# Altium schematic symbol library Mechanical.SchLib: 24 symbols
Pins are listed as number, name and electrical type; pins without a type are passive.

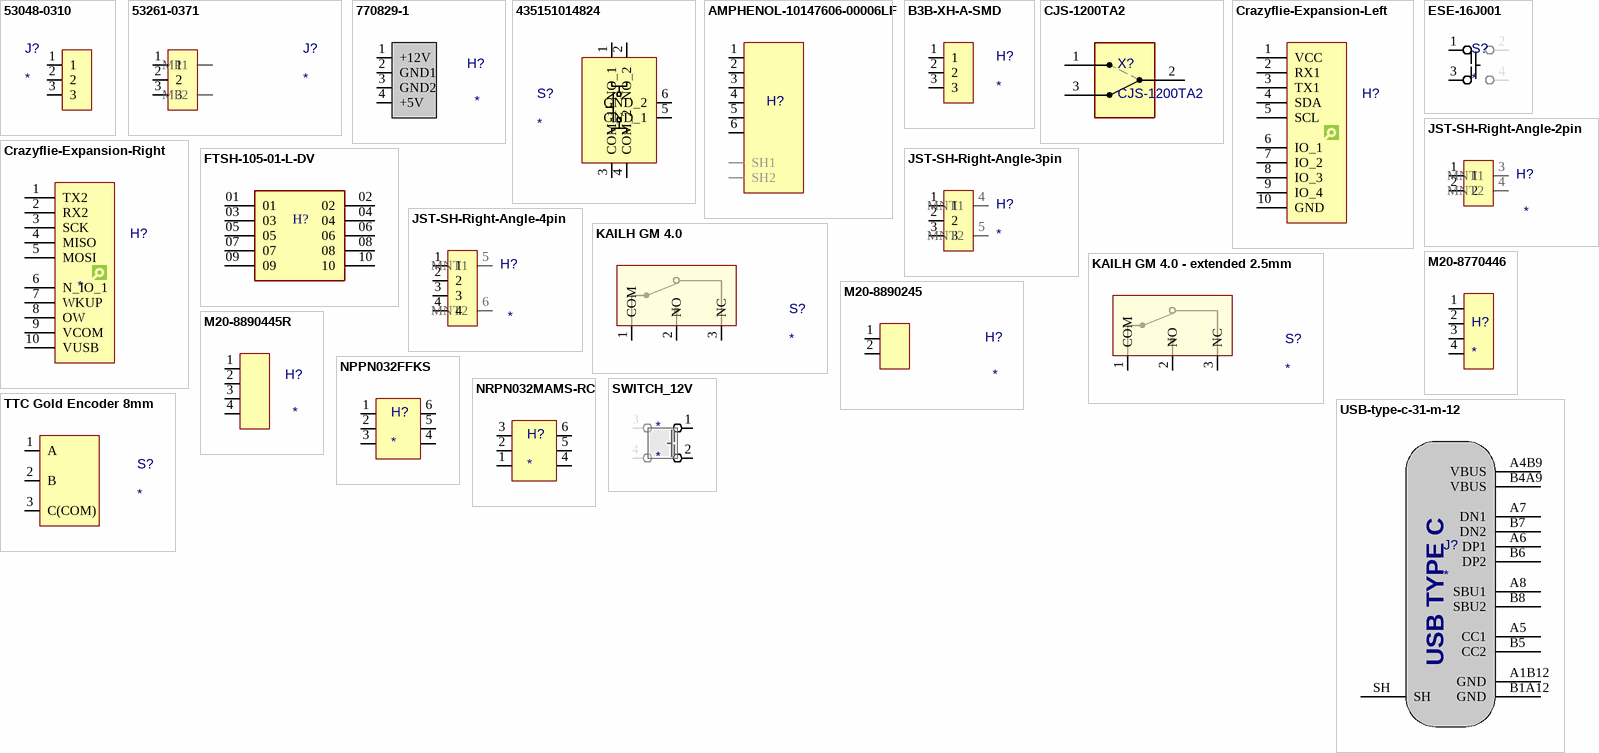
[diagram p0: symbols 53048-0310 to USB-type-c-31-m-12]

## 53048-0310
designator J?
Connector JST 1.25mm pitch THT; Manufacturer_Name: Molex; Manufacturer_Part_Number: 53048-0310; Description: Headers & Wire Housings RIGHT ANGLE HDR 3P; Datasheet Link: https://www.molex.com/pdm_docs/sd/530481010_sd.pdf; Height: 3.5mm; Mouser Part Number: 538-53048-0310; Mouser Price/Stock: https://www.mouser.co.uk/ProductDetail/Molex/53048-0310?qs=zXrbR4Jv0OfUlEeVnlaifA%3D%3D
footprint SHDRRA3W35P0X125_1X3_550X550X350P
pins: 1, 2, 3

## 53261-0371
designator J?
Headers & Wire Housings 1.25MM HDR 3 CKT Right-Angle; Manufacturer_Name: Molex; Manufacturer_Part_Number: 53261-0371; Datasheet Link: http://uk.rs-online.com/web/p/products/5427107P; Height: 3.6mm; Mouser Part Number: 538-53261-0371; Mouser Price/Stock: https://www.mouser.co.uk/ProductDetail/Molex/53261-0371?qs=%252B72YyncTwW%252BTQBxAO1kJjA%3D%3D
footprint 532610371 (Headers & Wire Housings 1.25MM HDR 3 CKT Right-Angle)
pins: 1, 2, 3, MP1, MP1 MP2

## 770829-1
designator H?
CONN HEADER SMD R/A 4POS 2.54MM; PACKAGING TAPE/REEL; 6MM MATING LENGTH; 1ROW; UNSHROUDED
footprint 770829-1 (Connector Header Surface Mount, Right Angle 4 position 0.200" (5.08mm))
pins: 1 +12V, 2 GND1, 3 GND2, 4 +5V

## 435151014824
designator S?
Switch normally open (NO); Manufacturer_Name: Wurth Elektronik; Manufacturer_Part_Number: 435151014824; Datasheet Link: https://componentsearchengine.com/Datasheets/2/435151014824.pdf; Height: 1.4mm; Mouser Part Number: 710-435151014824; Mouser Price/Stock: https://www.mouser.co.uk/ProductDetail/Wurth-Elektronik/435151014824?qs=OlC7AqGiEDkCCtReGm3ZVw%3D%3D
footprint 435151014824
pins: 1 NO_1, 2 NO_2, 3 COM_1, 4 COM_2, 5 GND_1, 6 GND_2

## AMPHENOL-10147606-00006LF
designator H?  (value not drawn)
Amphenol,1mm pitch, 6 Pos, 1 Row, SMD, Wire-to-Board, Right Angle, Male
footprint AMPHENOL-10147606-00006LF (Amphenol,1mm pitch, 6 Pos, 1 Row, SMD, Wire-to-Board, Right Angle, Male)
pins: 1, 2, 3, 4, 5, 6, SH1, SH2

## B3B-XH-A-SMD
designator H?
Repurposed as straight, side-looker SMD
footprint B3B-XH-A-SMD (Repursposed as straigh, side-looker SMD)
pins: 1, 2, 3

## CJS-1200TA2
designator X?
SPDT, ON-ON Slide, 100mA @ 6V DC J-Hook SMD Terminals, T&R 1,000 pc Packaging, Non-washable with tape - Tape and Reel; ComponentLink1Description: Datasheet; ComponentLink1URL: https://eu.mouser.com/datasheet/2/972/cjs-1827353.pdf; ComponentLink2Description: Product Detail; ComponentLink2URL: https://eu.mouser.com/ProductDetail/Nidec-Components/CJS-1200TA2?qs=XeJtXLiO41Rf26ws0igWdA%3D%3D
footprint CJS-1200TA2 (ON-ON Slide Switches smd jumper switch, J hook, w/o detent,non-washable,tape)
pins: 1 NO, 2 COM, 3 NC

## Crazyflie-Expansion-Left
designator H?  (value not drawn)
10pos, 20x2x3mm, pitch 2mm, female SMD header
footprint SMD-Header-110990442 (10pos, 20x2x3mm, pitch 2mm, female SMD header)
pins: 1 VCC, 2 RX1, 3 TX1, 4 SDA, 5 SCL, 6 IO_1, 7 IO_2, 8 IO_3, 9 IO_4, 10 GND

## Crazyflie-Expansion-Right
designator H?
10pos, 20x2x3mm, pitch 2mm, female SMD header
footprint SMD-Header-110990442 (10pos, 20x2x3mm, pitch 2mm, female SMD header)
pins: 1 TX2, 2 RX2, 3 SCK, 4 MISO, 5 MOSI, 6 N_IO_1, 7 WKUP, 8 OW, 9 VCOM, 10 VUSB

## ESE-16J001
designator S?
1VR Detector Switches, 2.2mmx3.35mm (Height:1.5mm), 250mN
footprint ESE-16J001 (1VR Detector Switches, 2.2mmx3.35mm (Height:1.5mm), 250mN. With increased pad height for hand-solderability)
pins: 1, 2, 3, 4

## FTSH-105-01-L-DV
designator H?  (value not drawn)
Samtec, 2x5 pin, 1.27mm pitch, used for SWD
footprint FTSH-105-01-L-DV (Samtec, 2x5 pin, 1.27mm pitch)
pins: 01, 02, 03, 04, 05, 06, 07, 08, 09, 10

## JST-SH-Right-Angle-2pin
designator H?
JST SH 2-pin SMD right angle, 3D model also contains cable connection / 3D model is just a rough approximation
footprint JST-SH-Right-Angle-2pin (JST SH 2-pin SMD right angle, 3D model also contains cable connection / 3D model is just a rough approximation)
pins: 1, 2, 3 MNT1, 4 MNT2

## JST-SH-Right-Angle-3pin
designator H?
JST SH 3-pin SMD right angle, 3D model also contains cable connection / 3D model is just a rough approximation
footprint JST-SH-Right-Angle-3pin (JST SH 3-pin SMD right angle, 3D model also contains cable connection / 3D model is just a rough approximation)
pins: 1, 2, 3, 4 MNT1, 5 MNT2

## JST-SH-Right-Angle-4pin
designator H?
JST SH 4-pin SMD right angle, 3D model also contains cable connection / 3D model is just a rough approximation
footprint JST-SH-Right-Angle-4pin (JST SH 4-pin SMD right angle, 3D model also contains cable connection / 3D model is just a rough approximation)
pins: 1, 2, 3, 4, 5 MNT1, 6 MNT2

## KAILH GM 4.0
designator S?
Gaming mouse micro switch 60M life for computer mice left right button
footprint KAILH GM 4.0 (Gaming mouse micro switch 60M life for computer mice left right button)
pins: 1 COM, 2 NO, 3 NC

## KAILH GM 4.0 - extended 2.5mm
designator S?
Gaming mouse micro switch 60M life for computer mice left right button
footprint KAILH GM 4.0 - extended 2.5mm (Gaming mouse micro switch 60M life for computer mice left right button. With vertical spacer to be used with (TBA/12mm) encoder heights.)
pins: 1 COM, 2 NO, 3 NC

## M20-8770446
designator H?
Header 4x2.54mm male - Harwin Headers & Wire Housings 04 SIL VERTICAL SMT HEADER TIN
footprint M20-8890445R (CONN HEADER SMD R/A 4POS 2.54MM)
pins: 1, 2, 3, 4

## M20-8890245
designator H?
CONN HEADER SMD R/A 2POS 2.54MM; PACKAGING TUBE; 6MM MATING LENGTH; 1ROW; UNSHROUDED
footprint M20-8890245 (CONN HEADER SMD R/A 2POS 2.54MM)
pins: 1, 2

## M20-8890445R
designator H?
CONN HEADER SMD R/A 4POS 2.54MM; PACKAGING TAPE/REEL; 6MM MATING LENGTH; 1ROW; UNSHROUDED
footprint M20-8890445R (CONN HEADER SMD R/A 4POS 2.54MM)
pins: 1, 2, 3, 4

## NPPN032FFKS
designator H?
CONN HDR 6POS 0.079 GOLD SMD 3x2, 2mm pitch
footprint NPPN032FFKS (smd header 3x2)
pins: 1, 2, 3, 4, 5, 6

## NRPN032MAMS-RC
designator H?
CONN HEADER SMD 6POS 2MM
footprint NRPN032MAMS-RC (CONN HEADER SMD 6POS 2MM)
pins: 1, 2, 3, 4, 5, 6

## SWITCH_12V
designator *
plunger style switch
footprint SWITCH_12V (plunger style switch)
pins: 1, 2, 3, 4

## TTC Gold Encoder 8mm
designator S?
Mouse scroll wheel encoder 8mm
footprint TTC Gold Encoder 8mm (Mouse scroll wheel encoder 8mm)
pins: 1 A, 2 B, 3 C(COM)

## USB-type-c-31-m-12
designator J?
footprint USB-type-c-31-m-12 (5A 1 16P Female Type-C SMD USB Connectors ROHS)
pins: A1B12 GND, A4B9 VBUS, A5 CC1, A6 DP1, A7 DN1, A8 SBU1, B1A12 GND, B4A9 VBUS, B5 CC2, B6 DP2, B7 DN2, B8 SBU2, SH
text: USB TYPE C